# EAGLE library part YB-ESP32-S3-RS485 (library yb-esp32-s3-rs485)
Yellobyte YB-ESP32-S3-RS485 (ESP32-S3 RS-485/Modbus-RTU/WiFi development board) Source: github.com/yellobyte/YB-ESP32-S3-RS485
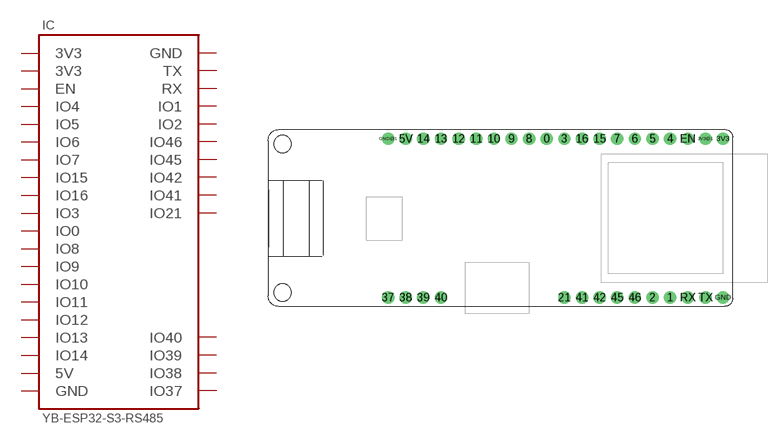
[diagram p0: symbol with the pads of YB-ESP32-S3-RS485; footprint YB-ESP32-S3-RS485]

Designator prefix IC

## YB-ESP32-S3-RS485  [YB-ESP32-S3-RS485]
0  IO0
1  IO1
2  IO2
3  IO3
3V3  3V3  pwr
3V3@1  3V3  pwr
4  IO4
5  IO5
5V  5V  pwr
6  IO6
7  IO7
8  IO8
9  IO9
10  IO10
11  IO11
12  IO12
13  IO13
14  IO14
15  IO15
16  IO16
21  IO21
37  IO37
38  IO38
39  IO39
40  IO40
41  IO41
42  IO42
45  IO45
46  IO46
EN  EN
GND  GND  pwr
GND@1  GND  pwr
RX  RX
TX  TX

## Footprint YB-ESP32-S3-RS485 (pad centres in mm)
drill 1.016 pad 1.778: 0 39.373,24.132; 1 57.153,1.272; 2 54.613,1.272; 3 41.913,24.132; 3V3 64.773,24.132; 3V3@1 62.233,24.132; 4 57.153,24.132; 5 54.613,24.132; 5V 19.053,24.132; 6 52.073,24.132; 7 49.533,24.132; 8 36.833,24.132; 9 34.293,24.132; 10 31.753,24.132; 11 29.213,24.132; 12 26.673,24.132; 13 24.133,24.132; 14 21.593,24.132; 15 46.993,24.132; 16 44.453,24.132; 21 41.913,1.272; 37 16.513,1.272; 38 19.053,1.272; 39 21.593,1.272; 40 24.133,1.272; 41 44.453,1.272; 42 46.993,1.272; 45 49.533,1.272; 46 52.073,1.272; EN 59.693,24.132; GND 64.773,1.272; GND@1 16.513,24.132; RX 59.693,1.272; TX 62.233,1.272